# Altium schematic symbol library audio%.SchLib: 34 symbols
Pins are listed as number, name and electrical type; pins without a type are passive.

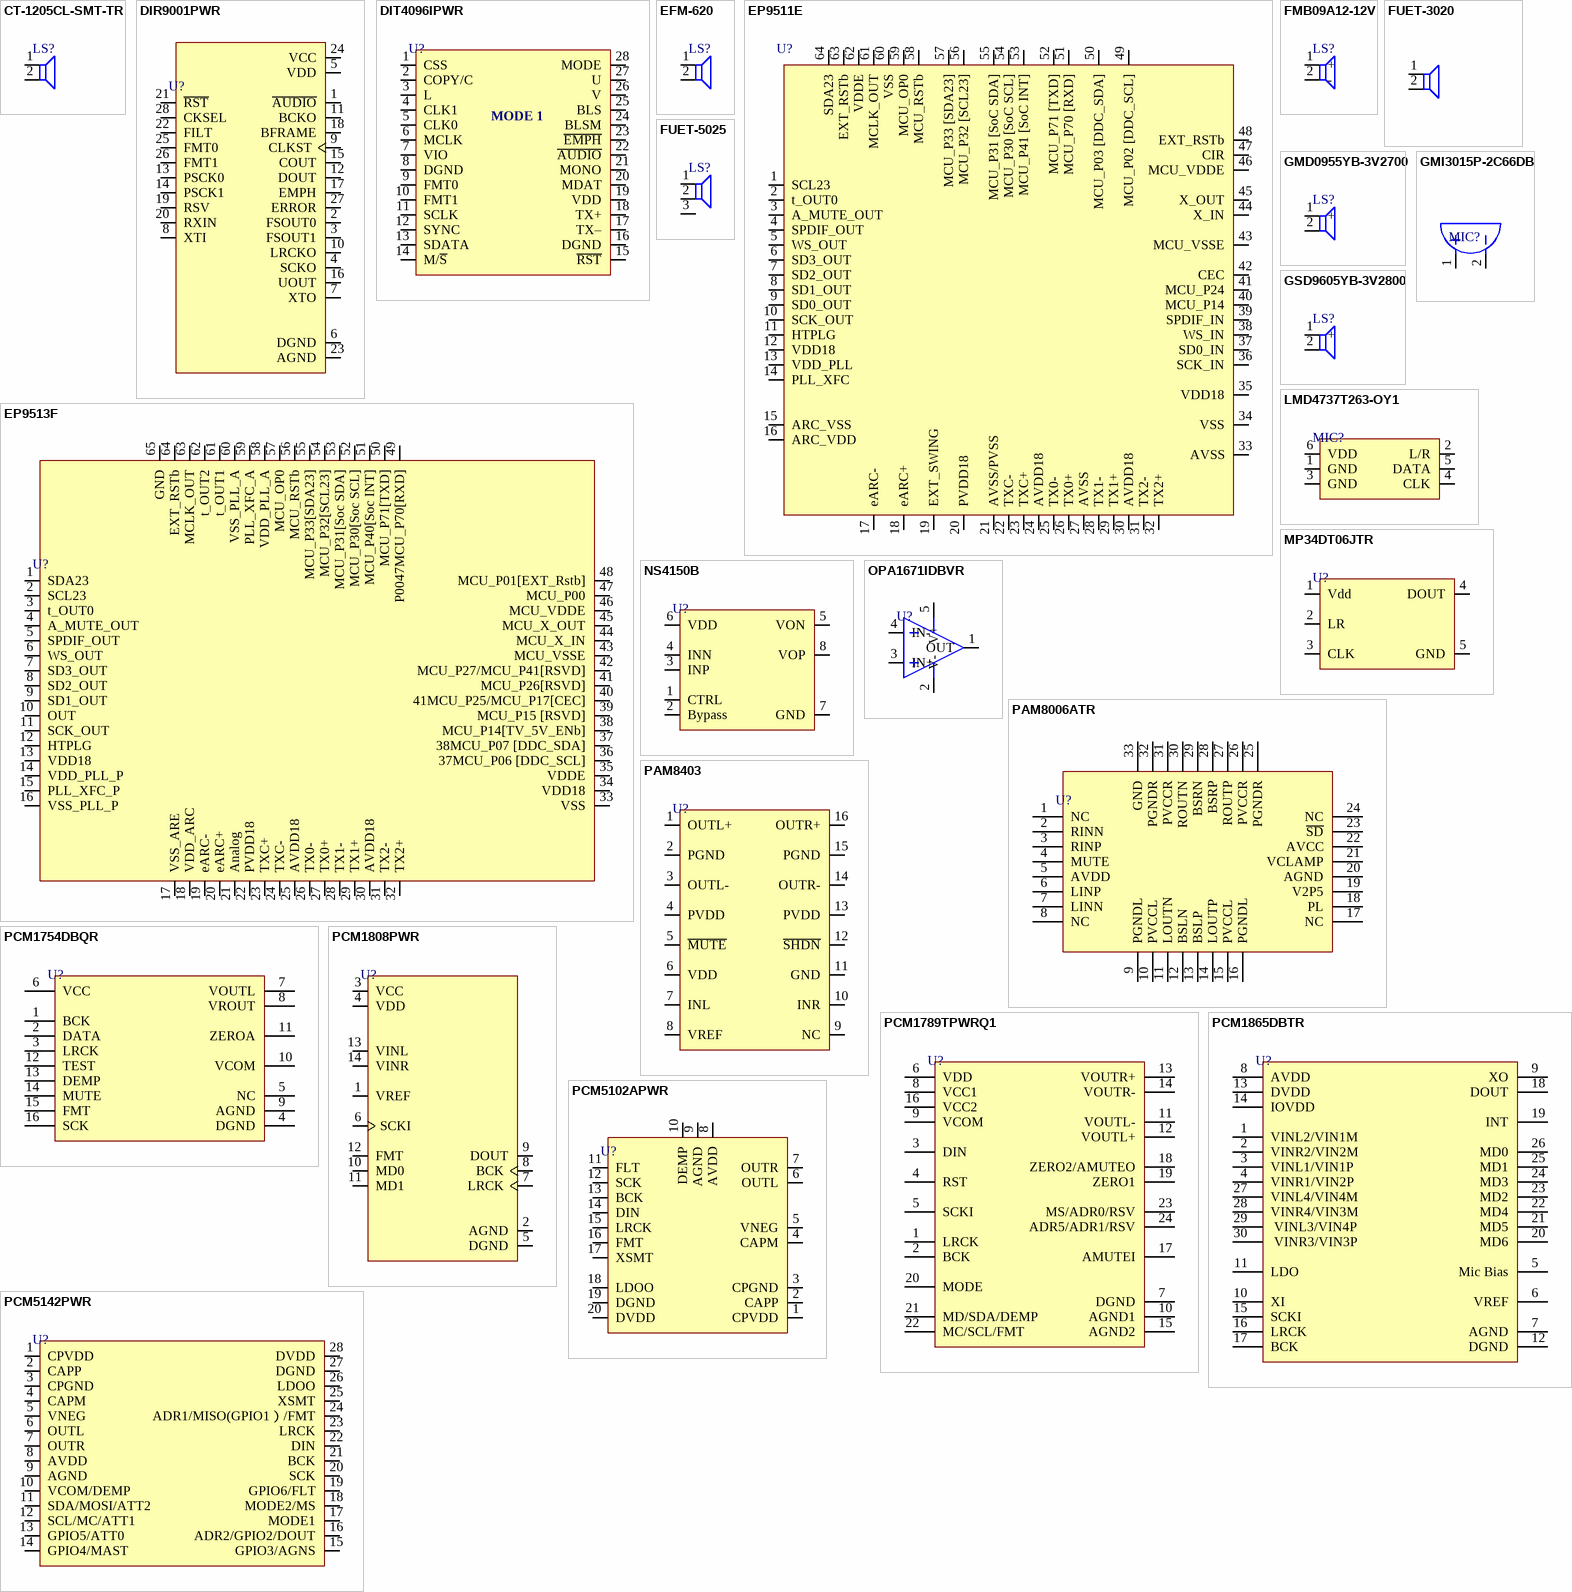
[diagram p0: symbols CT-1205CL-SMT-TR to PCM5142PWR]

## CT-1205CL-SMT-TR
designator LS?
12.8 mm, 5 V, 88 dB, 2.4 kHz, Surface Mount (SMT), Driving Circuit, Magnetic Audio Indicator Buzzer; Manufacturer: CUI; Manufacturer Part Number: CT-1205CL-SMT-TR; Frequency: 2.4kHz; Voltage Rating: 5V; Operating Supply Current: 30mA; Supplier: Digikey; Supplier Part Number: 102-1267-1-ND; RoHS: No; Category: Uncategorized; Stock: 58213; Pricing: 1=2.230000, 10=1.848000, 25=1.706400, 50=1.603400, 100=1.504100 (USD); Mounting Technology: Surface Mount; Case/Package: SMD/SMT; Min Operating Temperature: -30°C; Max Operating Temperature: 70°C; Termination: Solder; Package Quantity: 450; Packaging: Tape and Reel; Sensing Method: Magnetic; Length: 12.8mm; Width: 12.8mm; Height: 7.6mm; Lead Free: Lead Free; ComponentLink1URL: http://www.mouser.com/ds/2/670/ct-1205cl-smt-515776.pdf?src-supplier=Mouser; ComponentLink1Description: http://www.mouser.com/ds/2/670/ct-1205cl-smt-515776.pdf?src-supplier=Mouser; ComponentLink2URL: https://www.cui.com/product/resource/digikeypdf/ct-1205cl-smt.pdf?src-supplier=Digikey; ComponentLink2Description: https://www.cui.com/product/resource/digikeypdf/ct-1205cl-smt.pdf?src-supplier=Digikey
footprint CT-1205CL-SMT-TR
pins: 1 VCC, 2 GND

## DIR9001PWR
designator U?
IC AUDIO RECEIVER 28TSSOP; Manufacturer: Texas Instruments; Manufacturer Part Number: DIR9001PWR; Supplier: Mouser; Supplier Part Number: 595-DIR9001PWR; RoHS: Yes; Item Type: IC; Stock: 2518; Pricing: 1=3.45, 10=2.97, 50=2.97, 100=2.6, 1000=2.32, 10000=2.28 (USD); ComponentLink1URL: https://datasheet.ciiva.com/4770/sles198-127665-4770192.pdf?src-supplier=Mouser; ComponentLink1Description: https://datasheet.ciiva.com/4770/sles198-127665-4770192.pdf?src-supplier=Mouser; ComponentLink2URL: https://datasheet.ciiva.com/15134/getdatasheetpartid-306416-15134699.pdf?src-supplier=Verical; ComponentLink2Description: https://datasheet.ciiva.com/15134/getdatasheetpartid-306416-15134699.pdf?src-supplier=Verical; ComponentLink3URL: https://datasheet.ciiva.com/3148/dir9001-3148830.pdf?src-supplier=Avnet; ComponentLink3Description: https://datasheet.ciiva.com/3148/dir9001-3148830.pdf?src-supplier=Avnet; ComponentLink4URL: https://datasheet.ciiva.com/1826/dir9001-1826205.pdf?src-supplier=Digikey; ComponentLink4Description: https://datasheet.ciiva.com/1826/dir9001-1826205.pdf?src-supplier=Digikey
footprint TSSOP-28
pins: 1 ~{AUDIO}, 2 FSOUT0, 3 FSOUT1, 4 SCKO, 5 VDD, 6 DGND, 7 XTO, 8 XTI, 9 CLKST, 10 LRCKO, 11 BCKO, 12 DOUT, 13 PSCK0, 14 PSCK1, 15 COUT, 16 UOUT, 17 EMPH, 18 BFRAME, 19 RSV, 20 RXIN, 21 ~{RST}, 22 FILT, 23 AGND, 24 VCC, 25 FMT0, 26 FMT1, 27 ERROR, 28 CKSEL

## DIT4096IPWR
designator U?
96kHz Digital Audio Transmitter 28-TSSOP -40 to 85; Manufacturer: Texas Instruments; Manufacturer Part Number: DIT4096IPWR; Supplier: Digikey; Supplier Part Number: 296-DIT4096IPWRCT-ND; RoHS: Yes; Category: Amplifiers - Audio; Pricing: 1=3.39, 10=3.048, 25=2.8816, 100=2.4973, 250=2.36924, 500=2.12592, 1000=1.79295 (USD); ComponentLink1URL: https://datasheet.ciiva.com/1826/dit4096-1826182.pdf?src-supplier=Digikey; ComponentLink1Description: https://datasheet.ciiva.com/1826/dit4096-1826182.pdf?src-supplier=Digikey; ComponentLink2URL: https://datasheet.ciiva.com/3031/dit4096-3031069.pdf?src-supplier=Avnet; ComponentLink2Description: https://datasheet.ciiva.com/3031/dit4096-3031069.pdf?src-supplier=Avnet
footprint TSSOP-28
pins: 1 CSS, 2 COPY/C, 3 L, 4 CLK1, 5 CLK0, 6 MCLK, 7 VIO, 8 DGND, 9 FMT0, 10 FMT1, 11 SCLK, 12 SYNC, 13 SDATA, 14 M/~{S}, 15 ~{RST}, 16 DGND, 17 TX–, 18 TX+, 19 VDD, 20 MDAT, 21 MONO, 22 ~{AUDIO}, 23 ~{EMPH}, 24 BLSM, 25 BLS, 26 V, 27 U, 28 MODE
text: MODE 1

## EFM-620
designator LS?
BUZZER 9V 40MM TH; Manufacturer: East Electronics; Manufacturer Part Number: EFM-620; Pakage: Custom; Item Type: Buzzer; ComponentLink1Description: Digikey; ComponentLink1URL: https://www.digikey.com/en/products/detail/east-electronics/EFM-620/13170549
footprint EFM-620
pins: 1 -, 2 +

## EP9511E
designator U?
HDMI 1.4 Transmitterwith Audio In and eARC/ARC RX; Manufacturer: Semicon; Manufacturer Part Number: EP9511E; Item Type: IC; Package: QFN-64 (7x7)
footprint LQFP-64, (Body 7x 7)
pins: 1 SCL23, 2 t_OUT0, 3 A_MUTE_OUT, 4 SPDIF_OUT, 5 WS_OUT, 6 SD3_OUT, 7 SD2_OUT, 8 SD1_OUT, 9 SD0_OUT, 10 SCK_OUT, 11 HTPLG, 12 VDD18, 13 VDD_PLL, 14 PLL_XFC, 15 ARC_VSS, 16 ARC_VDD, 17 eARC-, 18 eARC+, 19 EXT_SWING, 20 PVDD18, 21 AVSS/PVSS, 22 TXC-, 23 TXC+, 24 AVDD18, 25 TX0-, 26 TX0+, 27 AVSS, 28 TX1-, 29 TX1+, 30 AVDD18, 31 TX2-, 32 TX2+, 33 AVSS, 34 VSS, 35 VDD18, 36 SCK_IN, 37 SD0_IN, 38 WS_IN, 39 SPDIF_IN, 40 MCU_P14, 41 MCU_P24, 42 CEC, 43 MCU_VSSE, 44 X_IN, 45 X_OUT, 46 MCU_VDDE, 47 CIR, 48 EXT_RSTb, 49 MCU_P02 [DDC_SCL], 50 MCU_P03 [DDC_SDA], 51 MCU_P70 [RXD], 52 MCU_P71 [TXD], 53 MCU_P41 [SoC INT], 54 MCU_P30 [SoC SCL], 55 MCU_P31 [SoC SDA], 56 MCU_P32 [SCL23], 57 MCU_P33 [SDA23], 58 MCU_RSTb, 59 MCU_OP0, 60 VSS, 61 MCLK_OUT, 62 VDDE, 63 EXT_RSTb, 64 SDA23

## EP9513F
designator U?
HDMI 2.1 Audio Tx; Manufacturer: Semicon; Manufacturer Part Number: EP9513F; Item Type: IC; Package: QFN-64 (8x8)
footprint QFN 64(8x8)
pins: 1 SDA23, 2 SCL23, 3 t_OUT0, 4 A_MUTE_OUT, 5 SPDIF_OUT, 6 WS_OUT, 7 SD3_OUT, 8 SD2_OUT, 9 SD1_OUT, 10 OUT, 11 SCK_OUT, 12 HTPLG, 13 VDD18, 14 VDD_PLL_P, 15 PLL_XFC_P, 16 VSS_PLL_P, 17 VSS_ARE, 18 VDD_ARC, 19 eARC-, 20 eARC+, 21 Analog, 22 PVDD18, 23 TXC+, 24 TXC-, 25 AVDD18, 26 TX0-, 27 TX0+, 28 TX1-, 29 TX1+, 30 AVDD18, 31 TX2-, 32 TX2+, 33 VSS, 34 VDD18, 35 VDDE, 36 37MCU_P06 [DDC_SCL], 37 38MCU_P07 [DDC_SDA], 38 MCU_P14[TV_5V_ENb], 39 MCU_P15 [RSVD], 40 41MCU_P25/MCU_P17[CEC], 41 MCU_P26[RSVD], 42 MCU_P27/MCU_P41[RSVD], 43 MCU_VSSE, 44 MCU_X_IN, 45 MCU_X_OUT, 46 MCU_VDDE, 47 MCU_P00, 48 MCU_P01[EXT_Rstb], 49 P0047MCU_P70[RXD], 50 MCU_P71[TXD], 51 MCU_P40[Soc INT], 52 MCU_P30[Soc SCL], 53 MCU_P31[Soc SDA], 54 MCU_P32[SCL23], 55 MCU_P33[SDA23], 56 MCU_RSTb, 57 MCU_OP0, 58 VDD_PLL_A, 59 PLL_XFC_A, 60 VSS_PLL_A, 61 t_OUT1, 62 t_OUT2, 63 MCLK_OUT, 64 EXT_RSTb, 65 GND

## FMB09A12-12V
designator LS?
80dB Active (driven circuit included) Magnetic 2.7kHz Plugin,D=9mm Buzzers ROHS; Manufacturer: FUET; Manufacturer Part Number: FMB09A12-12V; Package: Plugin,D=9mm; LCSC Part Number: C417387; Item Type: Buzzers; ComponentLink1Description: LCSC; ComponentLink1URL: https://www.lcsc.com/product-detail/Buzzers_FUET-FMB09A12-12V_C417387.html
footprint FMB09A12-12V
pins: 1 +, 2 -

## FUET-3020
designator LS?
SMD,3.2x3.2mm Buzzers ROHS; Manufacturer: FUET; Item Type: Buzzer; Manufacturer Part Number: FUET-3020; Package: SMD,3.2x3.2mm; LCSC Part Number: C2972843; ComponentLink1Description: LCSC; ComponentLink1URL: https://www.lcsc.com/product-detail/Buzzers_FUET-FUET-3020_C2972843.html
footprint FUET-3020
pins: 1 +, 2 -

## FUET-5025
designator LS?
80dB Passive (external drive) Electromagnetic Type 4kHz SMD,5x5mm Buzzers ROHS; Manufacturer: FUET; Manufacturer Part Number: FUET-5025; Package: SMD,5x5mm; LCSC Part Number: C391030; Item Type: Buzzers; ComponentLink1Description: LCSC; ComponentLink1URL: https://www.lcsc.com/product-detail/Buzzers_FUET-FUET-5025_C391030.html
footprint FUET-5025
pins: 1 +, 2 -, 3

## GMD0955YB-3V2700
designator LS?
80dB Active (Built-in Driver Circuit) Electromagnetic Type 2.7kHz Buzzers ROHS; Manufacturer: INGHAi; Manufacturer Part Number: GMD0955YB-3V2700; Package: Custom; LCSC Part Number: C252933; Item Type: Buzzers; ComponentLink1Description: LCSC; ComponentLink1URL: https://www.lcsc.com/product-detail/Buzzers_INGHAi-GMD0955YB-3V2700_C252933.html
footprint GMD0955YB-3V2700
pins: 1 +, 2 -

## GMI3015P-2C66DB
designator MIC?
Plugin,D=3mm Microphones ROHS; Manufacturer: INGHAi; Manufacturer Part Number: GMI3015P-2C66DB; Package: Plugin,D=3mm; LCSC Part Number: C529836; Item Type: Microphones; ComponentLink1Description: LCSC; ComponentLink1URL: https://www.lcsc.com/product-detail/span-style-background-color-ff0-Microphones-span_INGHAi-GMI3015P-2C66DB_C529836.html
footprint GMI3015P-2C66DB
pins: 1, 2

## GSD9605YB-3V2800
designator LS?
80dB Active (Built-in Driver Circuit) Electromagnetic Type 2.7kHz Buzzers ROHS; Manufacturer: INGHAi; Manufacturer Part Number: GSD9605YB-3V2800; Item Type: Buzzer; Package: Custom; LCSC Part Number: C255327; ComponentLink1Description: LCSC; ComponentLink1URL: https://www.lcsc.com/product-detail/Buzzers_INGHAi-GSD9605YB-3V2800_C255327.html
footprint GSD9605YB-3V2800
pins: 1 +, 2 -

## LMD4737T263-OY1
designator MIC?
Omnidirectional -26dB 57dB SMD-6P,4.7x3.8mm MEMS Microphones ROHS; Manufacturer: LinkMems; Manufacturer Part Number: LMD4737T263-OY1; Package: SMD-6P,4.7x3.8mm; LCSC Part Number: C5373239; Item Type: Microphones; ComponentLink1Description: LCSC; ComponentLink1URL: https://www.lcsc.com/product-detail/MEMS-Microphones_LinkMems-LMD4737T263-OY1_C5373239.html
footprint LMD4737T263-OY1
pins: 1 GND, 2 L/R, 3 GND, 4 CLK, 5 DATA, 6 VDD

## MP34DT06JTR
designator U?
MIC MEMS DIGITAL PDM OMNI -26DB; Manufacturer: STMicroelectronics; Manufacturer Part Number: MP34DT06JTR; Shape: Rectangular; Direction: Omnidirectional; Voltage Rating: 1.8V; Operating Supply Current: 650uA; Item Type: Microphone; Supplier 1: Mouser; RoHS: Yes; Category: Microphones; Stock 1: 6064; Pricing 1: 1=2.31, 10=1.92, 50=1.6, 100=1.51, 1000=1.24, 10000=1.23 (USD); Packaging: Cut Tape; Termination: Solder; Series: -; RoHS Compliant: Yes; ComponentLink1URL: http://www.farnell.com/datasheets/2710895.pdf?src-supplier=Farnell; ComponentLink1Description: http://www.farnell.com/datasheets/2710895.pdf?src-supplier=Farnell; ComponentLink2URL: https://www.st.com/resource/en/datasheet/mp34dt06j.pdf?src-supplier=Digi-Key; ComponentLink2Description: https://www.st.com/resource/en/datasheet/mp34dt06j.pdf?src-supplier=Digi-Key; ComponentLink3URL: http://www.farnell.com/datasheets/2710895.pdf?src-supplier=Newark; ComponentLink3Description: http://www.farnell.com/datasheets/2710895.pdf?src-supplier=Newark; ComponentLink4URL: http://www.farnell.com/datasheets/2710895.pdf?src-supplier=Element14; ComponentLink4Description: http://www.farnell.com/datasheets/2710895.pdf?src-supplier=Element14; Supplier Part Number 1: 511-MP34DT06JTR; LCSC Part Number: C503097
footprint MP34DT06JTR
pins: 1 Vdd, 2 LR, 3 CLK, 4 DOUT, 5 GND

## NS4150B
designator U?
3Wx1@4Ω Class D MSOP-8 Audio Power OpAmps ROHS; Manufacturer: Shenzhen Nsiway Tech; Manufacturer Part Number: NS4150B; Item Type: IC; Package: MSOP-8; LCSC Part Number: C189961; ComponentLink1Description: LCSC; ComponentLink1URL: https://www.lcsc.com/product-detail/Audio-Power-OpAmps_Shenzhen-Nsiway-Tech-NS4150B_C189961.html
footprint 8-MSOP (0.118", 3.00mm Width)
pins: 1 CTRL, 2 Bypass, 3 INP, 4 INN, 5 VON, 6 VDD, 7 GND, 8 VOP

## OPA1671IDBVR
designator U?
IC AUDIO 1 CIRCUIT SOT23-5; Manufacturer: Texas Instruments; Manufacturer Part Number: OPA1671IDBVR; Description: Low-Noise/Rail-to-Rail Audio Operational Amplifier 5V/us 5-Pin SOT-23 T/R; Supplier: Mouser; LCSC Part Number: C1849409; RoHS: Yes; Item Type: IC; Stock: 6432; Pricing: 1=1.09, 10=0.786, 50=0.711, 100=0.627, 1000=0.536, 10000=0.505 (USD)
footprint SOT-23-5
pins: 1 OUT, 2 V- (power), 3 IN+, 4 IN-, 5 V+ (power)

## PAM8006ATR
designator U?
IC AMP AUDIO 15W CLASS D 32UQFN; Manufacturer: Diodes; Manufacturer Part Number: PAM8006ATR; Voltage Gain: 32dB; Min Supply Voltage: 8V; Max Supply Voltage: 18V; Max Output Power: 10W; Power Supply Rejection Ratio (PSRR): 65dB; Supplier 1: Rs; RoHS: Yes; Category: Amplifiers - Audio; Stock 1: 596; Pricing 1: 2=2.11500 (GBP); Mounting Technology: Surface Mount; Case/Package: QFN; Pins: 32; Min Operating Temperature: -20°C; Max Operating Temperature: 85°C; Packaging: Tape and Reel; Package Quantity: 3000; Series: -; Length: 5mm; Width: 5mm; Height: 0.75mm; Radiation Hardening: No; Lead Free: Lead Free; RoHS Compliant: Yes; ComponentLink1URL: https://datasheet.ciiva.com/24013/pam8006a-247273-24013164.pdf?src-supplier=Mouser; ComponentLink1Description: https://datasheet.ciiva.com/24013/pam8006a-247273-24013164.pdf?src-supplier=Mouser; ComponentLink2URL: https://datasheet.ciiva.com/29896/pam8006a-29896322.pdf?src-supplier=Avnet; ComponentLink2Description: https://datasheet.ciiva.com/29896/pam8006a-29896322.pdf?src-supplier=Avnet; ComponentLink3URL: https://datasheet.ciiva.com/30481/0900766b81268cf3-30481630.pdf?src-supplier=Rs; ComponentLink3Description: https://datasheet.ciiva.com/30481/0900766b81268cf3-30481630.pdf?src-supplier=Rs; Supplier Part Number 1: 7902950; LCSC Part Number: C167118; Item Type: IC
footprint 32-QFN (32pins, 5x5mm body, 0.5mm pitch QFN package)
pins: 1 NC, 2 RINN, 3 RINP, 4 MUTE, 5 AVDD, 6 LINP, 7 LINN, 8 NC, 9 PGNDL, 10 PVCCL, 11 LOUTN, 12 BSLN, 13 BSLP, 14 LOUTP, 15 PVCCL, 16 PGNDL, 17 NC, 18 PL, 19 V2P5, 20 AGND, 21 VCLAMP, 22 AVCC, 23 ~{SD}, 24 NC, 25 PGNDR, 26 PVCCR, 27 ROUTP, 28 BSRP, 29 BSRN, 30 ROUTN, 31 PVCCR, 32 PGNDR, 33 GND

## PAM8403
designator U?
SOP-16 Audio Power OpAmps ROHS; Manufacturer: Slkor; Manufacturer Part Number: PAM8403; Item Type: IC; Package: SOP-16; LCSC Part Number: C5122557; ComponentLink1Description: LCSC; ComponentLink1URL: https://www.lcsc.com/product-detail/Audio-Power-OpAmps_Slkor-SLKORMICRO-Elec-PAM8403_C5122557.html
footprint SOP-16_150mil
pins: 1 OUTL+, 2 PGND, 3 OUTL-, 4 PVDD, 5 ~{MUTE}, 6 VDD, 7 INL, 8 VREF, 9 NC, 10 INR, 11 GND, 12 ~{SHDN}, 13 PVDD, 14 OUTR-, 15 PGND, 16 OUTR+

## PCM1754DBQR
designator U?
IC DAC/AUDIO 24BIT 200K 16SSOP; Manufacturer: Texas Instruments; Manufacturer Part Number: PCM1754DBQR; Number of DAC Channels: 2; Operating Supply Voltage: 5V; Max Power Dissipation: 105mW; Interface: Serial,3-WIRE; Number of Bits: 24; Sampling Rate: 192000S/s; Resolution: 24b; Signal to Noise Ratio (SNR): 106dB; Supply Type: Single; Conversion Rate: 192KS/s; Nominal Supply Current: 30mA; Power Consumption: 80mW; Number of Analog Inputs: 0; Output Type: Voltage; Min Supply Voltage: 4.5V; Max Supply Voltage: 5.5V; Integral Nonlinearity (INL): 0.5LSB; Polarity: Bipolar; Supplier 1: Mouser; RoHS: Yes; Category: Amplifiers - Audio; Stock 1: 908; Pricing 1: 1=2.14000, 10=1.93000, 25=1.82000, 50=1.82000, 100=1.55000, 250=1.46000, 500=1.28000, 1000=1.06000, 10000=1.06000 (USD); Mount: Surface Mount; Case/Package: SSOP; Number of Pins: 16; Weight: 0.002603oz; Contact Plating: Gold; Min Operating Temperature: -40°C; Max Operating Temperature: 85°C; Packaging: Tape and Reel; Number of Channels: 2; Package Quantity: 2000; Number of Converters: 2; Number of Analog Outputs: 2; Series: PCM1754; Output Polarity: Bipolar; Length: 5mm; Width: 4mm; Height: 1.5mm; Radiation Hardening: No; Lead Free: Lead Free; RoHS Compliant: Yes; ComponentLink1URL: https://datasheet.ciiva.com/41460/001186173-da-01-en-ic-dac-24bit-mon-pcm1754dbqr-ssop-16-tid-41460109.pdf?src-supplier=Conrad; ComponentLink1Description: https://datasheet.ciiva.com/41460/001186173-da-01-en-ic-dac-24bit-mon-pcm1754dbqr-ssop-16-tid-41460109.pdf?src-supplier=Conrad; ComponentLink2URL: https://datasheet.ciiva.com/1388/pcm1753-1388404.pdf?src-supplier=Digi-Key; ComponentLink2Description: https://datasheet.ciiva.com/1388/pcm1753-1388404.pdf?src-supplier=Digi-Key; ComponentLink3URL: https://datasheet.ciiva.com/1388/pcm1753-1388403.pdf?src-supplier=Digi-Key; ComponentLink3Description: https://datasheet.ciiva.com/1388/pcm1753-1388403.pdf?src-supplier=Digi-Key; ComponentLink4URL: https://datasheet.ciiva.com/1388/pcm1753-1388405.pdf?src-supplier=Digi-Key; ComponentLink4Description: https://datasheet.ciiva.com/1388/pcm1753-1388405.pdf?src-supplier=Digi-Key; ComponentLink5URL: https://datasheet.ciiva.com/15146/getdatasheetpartid-213919-15146955.pdf?src-supplier=Verical; ComponentLink5Description: https://datasheet.ciiva.com/15146/getdatasheetpartid-213919-15146955.pdf?src-supplier=Verical; Supplier Part Number 1: 595-PCM1754DBQR; Item Type: IC
footprint 16-SSOP
pins: 1 BCK, 2 DATA, 3 LRCK, 4 DGND, 5 NC, 6 VCC, 7 VOUTL, 8 VROUT, 9 AGND, 10 VCOM, 11 ZEROA, 12 TEST, 13 DEMP, 14 MUTE, 15 FMT, 16 SCK

## PCM1789TPWRQ1
designator U?
IC DAC/AUDIO 24BIT 192K 24TSSOP; Manufacturer: Texas Instruments; Manufacturer Part Number: PCM1789TPWRQ1; Number of Channels: 2; Operating Supply Voltage: 5V; Min Supply Voltage: 4.5V; Max Supply Voltage: 5.5V; Interface: I2C,SPI,Serial,3-WIRE; Max Power Dissipation: 239mW; Number of Bits: 24; Resolution: 24b; Supply Type: Analog,Digital; Conversion Rate: 192KS/s; Power Consumption: 154mW; Number of Analog Inputs: 0; Output Type: Voltage; Supplier 1: Digi-Key; RoHS: Yes; Category: Amplifiers - Audio; Mount: Surface Mount; Case/Package: TSSOP; Number of Pins: 24; Min Operating Temperature: -40°C; Max Operating Temperature: 105°C; Packaging: Tape and Reel; Number of DAC Channels: 2; Package Quantity: 2000; Number of Converters: 2; Number of Analog Outputs: 2; Series: PCM1789-Q1; Lead Free: Lead Free; RoHS Compliant: Yes; ComponentLink1URL: https://datasheet.ciiva.com/1389/pcm1789-q1-1389256.pdf?src-supplier=Digi-Key; ComponentLink1Description: https://datasheet.ciiva.com/1389/pcm1789-q1-1389256.pdf?src-supplier=Digi-Key; ComponentLink2URL: https://datasheet.ciiva.com/14255/sbas546-14255107.pdf?src-supplier=Avnet; ComponentLink2Description: https://datasheet.ciiva.com/14255/sbas546-14255107.pdf?src-supplier=Avnet; Supplier Part Number 1: 296-28413-1-ND; LCSC Part Number: C2864058; Item Type: IC
footprint 24-TSSOP_
pins: 1 LRCK, 2 BCK, 3 DIN, 4 RST, 5 SCKI, 6 VDD, 7 DGND, 8 VCC1, 9 VCOM, 10 AGND1, 11 VOUTL-, 12 VOUTL+, 13 VOUTR+, 14 VOUTR-, 15 AGND2, 16 VCC2, 17 AMUTEI, 18 ZERO2/AMUTEO, 19 ZERO1, 20 MODE, 21 MD/SDA/DEMP, 22 MC/SCL/FMT, 23 MS/ADR0/RSV, 24 ADR5/ADR1/RSV

## PCM1808PWR
designator U?
IC ADC/AUDIO 24BIT 96K 14TSSOP; Manufacturer: Texas Instruments; Manufacturer Part Number: PCM1808PWR; Item Type: Amplifiers - Audio; Supplier: Mouser; Supplier Part Number: 595-PCM1808PWR; RoHS: Yes; Stock: 10269; Pricing: 1=1.6, 10=1.36, 50=1.36, 100=1.16, 1000=0.786, 10000=0.744 (USD); ComponentLink1URL: https://datasheet.ciiva.com/41460/001186600-da-01-en-ic-adc-24bit-ste-pcm1808pwr-tssop-14-tid-41460829.pdf?src-supplier=Conrad; ComponentLink1Description: https://datasheet.ciiva.com/41460/001186600-da-01-en-ic-adc-24bit-ste-pcm1808pwr-tssop-14-tid-41460829.pdf?src-supplier=Conrad; ComponentLink2URL: https://datasheet.ciiva.com/7989/1764047-7989228.pdf?src-supplier=Element14; ComponentLink2Description: https://datasheet.ciiva.com/7989/1764047-7989228.pdf?src-supplier=Element14; ComponentLink3URL: https://datasheet.ciiva.com/1260/pcm1808-1260372.pdf?src-supplier=Digikey; ComponentLink3Description: https://datasheet.ciiva.com/1260/pcm1808-1260372.pdf?src-supplier=Digikey; ComponentLink4URL: https://datasheet.ciiva.com/1260/pcm1808-1260370.pdf?src-supplier=Digikey; ComponentLink4Description: https://datasheet.ciiva.com/1260/pcm1808-1260370.pdf?src-supplier=Digikey; ComponentLink5URL: https://datasheet.ciiva.com/1260/pcm1808-1260371.pdf?src-supplier=Digikey; ComponentLink5Description: https://datasheet.ciiva.com/1260/pcm1808-1260371.pdf?src-supplier=Digikey; ComponentLink6URL: https://datasheet.ciiva.com/15148/getdatasheetpartid-184690-15148071.pdf?src-supplier=Verical; ComponentLink6Description: https://datasheet.ciiva.com/15148/getdatasheetpartid-184690-15148071.pdf?src-supplier=Verical; LCSC Part Number: C55513
footprint 14-TSSOP
pins: 1 VREF, 2 AGND, 3 VCC, 4 VDD, 5 DGND, 6 SCKI, 7 LRCK, 8 BCK, 9 DOUT, 10 MD0, 11 MD1, 12 FMT, 13 VINL, 14 VINR

## PCM1865DBTR
designator U?
IC ADC/AUDIO 24BIT 192K 30TSSOP; Manufacturer: Texas Instruments; Manufacturer Part Number: PCM1865DBTR; Interface: I2C,SPI,Serial; Operating Supply Voltage: 3.3V; Sampling Rate: 192KS/s; Resolution: 24b; Operating Supply Current: 31mA; Supply Type: Single; Number of A/D Converters: 4; Power Consumption: 145mW; Max Supply Voltage: 3.6V; Min Supply Voltage: 3V; Number of Analog Inputs: 8; Number of DAC Channels: 0; Supplier 1: Mouser; RoHS: Yes; Category: Amplifiers - Audio; Pricing 1: 1=10.72000, 10=9.69000, 25=9.23000, 50=9.23000, 100=8.02000, 250=7.66000, 500=6.98000, 1000=6.54000, 10000=6.54000 (USD); Mount: Surface Mount; Case/Package: TSSOP; Number of Pins: 30; Weight: 0.003439oz; Contact Plating: Gold; Min Operating Temperature: -40°C; Max Operating Temperature: 125°C; Package Quantity: 2000; Packaging: Tape and Reel; Number of ADC Channels: 4; Lead Free: Lead Free; RoHS Compliant: Yes; ComponentLink1URL: https://datasheet.ciiva.com/48474/pcm1861-48474798.pdf?src-supplier=Avnet; ComponentLink1Description: https://datasheet.ciiva.com/48474/pcm1861-48474798.pdf?src-supplier=Avnet; ComponentLink2URL: https://datasheet.ciiva.com/29699/pcm1861-29699238.pdf?src-supplier=Digi-Key; ComponentLink2Description: https://datasheet.ciiva.com/29699/pcm1861-29699238.pdf?src-supplier=Digi-Key; Supplier Part Number 1: 595-PCM1865DBTR; LCSC Part Number: C181312
footprint TSSOP-30
pins: 1 VINL2/VIN1M, 2 VINR2/VIN2M, 3 VINL1/VIN1P, 4 VINR1/VIN2P, 5 Mic Bias, 6 VREF, 7 AGND, 8 AVDD, 9 XO, 10 XI, 11 LDO, 12 DGND, 13 DVDD, 14 IOVDD, 15 SCKI, 16 LRCK, 17 BCK, 18 DOUT, 19 INT, 20 MD6, 21 MD5, 22 MD4, 23 MD2, 24 MD3, 25 MD1, 26 MD0, 27 VINL4/VIN4M, 28 VINR4/VIN3M, 29  VINL3/VIN4P, 30  VINR3/VIN3P

## PCM5102APWR
designator U?
IC DAC 16/24/32BIT 384K 20TSSOP; Manufacturer: Texas Instruments; Manufacturer Part Number: PCM5102APWR; Supplier: Mouser; Supplier Part Number: 595-PCM5102APWR; RoHS: Yes; Category: Digital to Analog Converters (DACs); Stock: 2740; Pricing: 1=5.76, 10=4.87, 50=4.87, 100=4.1, 1000=3.13, 10000=2.65 (USD); ComponentLink1URL: https://datasheet.ciiva.com/24021/slas859a-261040-24021907.pdf?src-supplier=Mouser; ComponentLink1Description: https://datasheet.ciiva.com/24021/slas859a-261040-24021907.pdf?src-supplier=Mouser; ComponentLink2URL: https://datasheet.ciiva.com/29648/pcm5102a-29648362.pdf?src-supplier=Digi-Key; ComponentLink2Description: https://datasheet.ciiva.com/29648/pcm5102a-29648362.pdf?src-supplier=Digi-Key; ComponentLink3URL: https://datasheet.ciiva.com/6673/pcm5102a-6673611.pdf?src-supplier=Digi-Key; ComponentLink3Description: https://datasheet.ciiva.com/6673/pcm5102a-6673611.pdf?src-supplier=Digi-Key; LCSC Part Number: C107671; Item Type: IC
footprint TSSOP-20
pins: 1 CPVDD, 2 CAPP, 3 CPGND, 4 CAPM, 5 VNEG, 6 OUTL, 7 OUTR, 8 AVDD, 9 AGND, 10 DEMP, 11 FLT, 12 SCK, 13 BCK, 14 DIN, 15 LRCK, 16 FMT, 17 XSMT, 18 LDOO, 19 DGND, 20 DVDD

## PCM5142PWR
designator U?
IC DAC 16/24/32BIT 384K 28TSSOP; Manufacturer: Texas Instruments; Manufacturer Part Number: PCM5142PWR; Item Type: Amplifiers - Audio; Supplier: Mouser; Supplier Part Number: 595-PCM5142PWR; RoHS: Yes; Stock: 1067; Pricing: 1=5.34, 10=4.96, 50=4.78, 100=4.34, 1000=3.64, 10000=3.26 (USD); ComponentLink1URL: https://datasheet.ciiva.com/6666/pcm5142-6666454.pdf?src-supplier=Digikey; ComponentLink1Description: https://datasheet.ciiva.com/6666/pcm5142-6666454.pdf?src-supplier=Digikey; ComponentLink2URL: https://datasheet.ciiva.com/6666/pcm5142-6666455.pdf?src-supplier=Digikey; ComponentLink2Description: https://datasheet.ciiva.com/6666/pcm5142-6666455.pdf?src-supplier=Digikey; ComponentLink3URL: https://datasheet.ciiva.com/6666/pcm5142-6666456.pdf?src-supplier=Digikey; ComponentLink3Description: https://datasheet.ciiva.com/6666/pcm5142-6666456.pdf?src-supplier=Digikey; LCSC Part Number: C180370
footprint TSSOP-28
pins: 1 CPVDD, 2 CAPP, 3 CPGND, 4 CAPM, 5 VNEG, 6 OUTL, 7 OUTR, 8 AVDD, 9 AGND, 10 VCOM/DEMP, 11 SDA/MOSI/ATT2, 12 SCL/MC/ATT1, 13 GPIO5/ATT0, 14 GPIO4/MAST, 15 GPIO3/AGNS, 16 ADR2/GPIO2/DOUT, 17 MODE1, 18 MODE2/MS, 19 GPIO6/FLT, 20 SCK, 21 BCK, 22 DIN, 23 LRCK, 24 ADR1/MISO(GPIO1）/FMT, 25 XSMT, 26 LDOO, 27 DGND, 28 DVDD

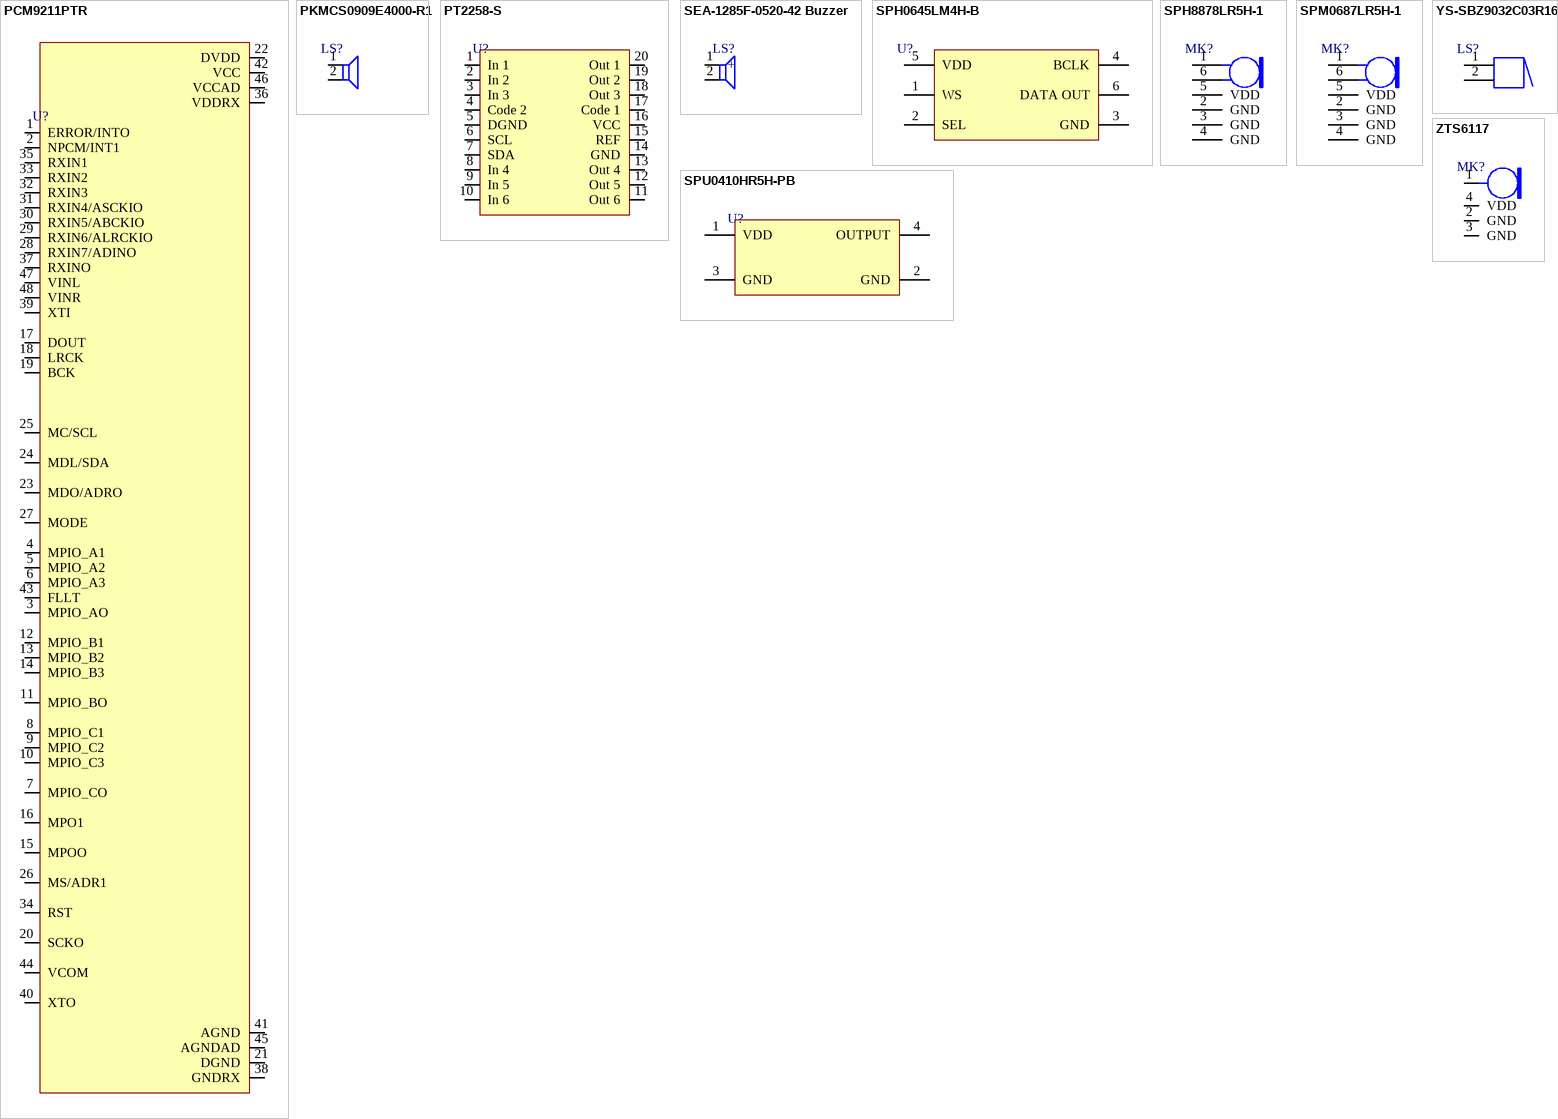
[diagram p1: symbols PCM9211PTR to ZTS6117]

## PCM9211PTR
designator U?
IC AUDIO TRANSCEIVER 48LQFP; Manufacturer: Texas Instruments; Manufacturer Part Number: PCM9211PTR; Item Type: Amplifiers - Audio; Supplier: Mouser; Supplier Part Number: 595-PCM9211PTR; RoHS: Yes; Stock: 2280; Pricing: 1=3.06, 10=2.74, 50=2.74, 100=2.51, 1000=1.8, 10000=1.49 (USD); ComponentLink1URL: https://datasheet.ciiva.com/1825/pcm9211-1825949.pdf?src-supplier=Digikey; ComponentLink1Description: https://datasheet.ciiva.com/1825/pcm9211-1825949.pdf?src-supplier=Digikey; ComponentLink2URL: https://datasheet.ciiva.com/3026/sbas495-3026720.pdf?src-supplier=Avnet; ComponentLink2Description: https://datasheet.ciiva.com/3026/sbas495-3026720.pdf?src-supplier=Avnet; ComponentLink3URL: https://datasheet.ciiva.com/1825/pcm9211-1825950.pdf?src-supplier=Digikey; ComponentLink3Description: https://datasheet.ciiva.com/1825/pcm9211-1825950.pdf?src-supplier=Digikey; ComponentLink4URL: https://datasheet.ciiva.com/1825/pcm9211-1825951.pdf?src-supplier=Digikey; ComponentLink4Description: https://datasheet.ciiva.com/1825/pcm9211-1825951.pdf?src-supplier=Digikey
footprint 48-LQFP (7x7)
pins: 1 ERROR/INTO, 2 NPCM/INT1, 3 MPIO_AO, 4 MPIO_A1, 5 MPIO_A2, 6 MPIO_A3, 7 MPIO_CO, 8 MPIO_C1, 9 MPIO_C2, 10 MPIO_C3, 11 MPIO_BO, 12 MPIO_B1, 13 MPIO_B2, 14 MPIO_B3, 15 MPOO, 16 MPO1, 17 DOUT, 18 LRCK, 19 BCK, 20 SCKO, 21 DGND, 22 DVDD, 23 MDO/ADRO, 24 MDL/SDA, 25 MC/SCL, 26 MS/ADR1, 27 MODE, 28 RXIN7/ADINO, 29 RXIN6/ALRCKIO, 30 RXIN5/ABCKIO, 31 RXIN4/ASCKIO, 32 RXIN3, 33 RXIN2, 34 RST, 35 RXIN1, 36 VDDRX, 37 RXINO, 38 GNDRX, 39 XTI, 40 XTO, 41 AGND, 42 VCC, 43 FLLT, 44 VCOM, 45 AGNDAD, 46 VCCAD, 47 VINL, 48 VINR

## PKMCS0909E4000-R1
designator LS?
BUZZER PIEZO 1.5V 9X9MM SMD; Manufacturer: Murata; Manufacturer Part Number: PKMCS0909E4000-R1; Supplier: Rs; Supplier Part Number: 9010898P; RoHS: Yes; Category: Buzzers; Stock: 4400; Pricing: 50=0.646, 100=0.598, 250=0.55, 500=0.504 (GBP); ComponentLink1URL: https://datasheet.ciiva.com/24244/pkmcs0909e4000-r1-304946-24244386.pdf?src-supplier=Mouser; ComponentLink1Description: https://datasheet.ciiva.com/24244/pkmcs0909e4000-r1-304946-24244386.pdf?src-supplier=Mouser; Item Type: BUZZER
footprint PKMCS0909E4000-R1
pins: 1 +, 2 -

## PT2258-S
designator U?
SOP-20-300mil Audio Interface ICs ROHS; Manufacturer: PTC; Manufacturer Part Number: PT2258-S; Item Type: IC; Package: SOP-20-300mil; LCSC Part Number: C99213; ComponentLink1Description: LCSC; ComponentLink1URL: https://www.lcsc.com/product-detail/Audio-Interface-ICs_PTC-Princeton-Tech-PT2258-S_C99213.html
footprint SOP-20-300mil
pins: 1 In 1, 2 In 2, 3 In 3, 4 Code 2, 5 DGND, 6 SCL, 7 SDA, 8 In 4, 9 In 5, 10 In 6, 11 Out 6, 12 Out 5, 13 Out 4, 14 GND, 15 REF, 16 VCC, 17 Code 1, 18 Out 3, 19 Out 2, 20 Out 1

## SEA-1285F-0520-42 Buzzer
designator LS?
85dB Passive (external drive) Electromagnetic Type 2kHz Plugin,D=12mm Buzzers ROHS; Manufacturer: S&S; Manufacturer Part Number: SEA-1285F-0520-42Ω-40P6.5; LCSC Part Number: C2693578; Item Type: Buzzers; ComponentLink1Description: LCSC; ComponentLink1URL: https://www.lcsc.com/product-detail/Buzzers_S-S-SEA-1285F-0520-42-40P6-5_C2693578.html
footprint Plugin,D=12mm
pins: 1 +, 2 -

## SPH0645LM4H-B
designator U?
CRAWFORD MIC DGT I2S BOTTOM PORT; Manufacturer: Knowles; Manufacturer Part Number: SPH0645LM4H-B; Shape: Rectangular; Direction: Omnidirectional; Voltage Rating: 1.8V; Operating Supply Current: 600uA; Output Type: Digital; Supplier 1: Digi-Key; Stock 1: 20813; Pricing 1: 1=2.88, 10=2.384, 25=2.2008, 50=2.0678, 100=1.9398, 500=1.66194, 1000=1.64372 (USD); Packaging: Tape and Reel; Termination: Solder; Length: 3.5mm; Width: 2.65mm; Height: 1.08mm; RoHS Compliant: Yes; ComponentLink1URL: https://media.digikey.com/pdf/Data%20Sheets/Knowles%20Acoustics%20PDFs/SPH0645LM4H-B.pdf?src-supplier=Digi-Key; ComponentLink1Description: https://media.digikey.com/pdf/Data%20Sheets/Knowles%20Acoustics%20PDFs/SPH0645LM4H-B.pdf?src-supplier=Digi-Key; Supplier Part Number 1: 423-1405-1-ND
footprint SPH0645LM4H-B_ (MEMS Microphones DIG MEMs Mic, BP w/ I2S output)
pins: 1 WS, 2 SEL, 3 GND, 4 BCLK, 5 VDD, 6 DATA OUT

## SPH8878LR5H-1
designator MK?
Lovato Analog Bottom Port Mic; Manufacturer: Knowles; Manufacturer Part Number: SPH8878LR5H-1; Item Type: Microphone; Supplier 1: Digi-Key; RoHS: No; Category: Microphones; Stock 1: 1676; Pricing 1: 1=1.45000, 10=1.20800, 25=1.11760, 50=1.05220, 100=0.98880, 500=0.85076, 1000=0.79529 (USD); Supplier Part Number 1: 423-SPH8878LR5H-1CT-ND; LCSC Part Number: *
footprint SPH8878LR5H-1
pins: 1 OUT+, 2 GND, 3 GND, 4 GND, 5 VDD, 6 OUT-

## SPM0687LR5H-1
designator MK?
WINFREY MIC HI SNR/AOP BOT PORT; Manufacturer: Knowles; Manufacturer Part Number: SPM0687LR5H-1; Shape: Rectangular; Output Type: Analog; Operating Supply Current: 285uA; Item Type: Microphone; Supplier 1: Digi-Key; RoHS: Yes; Category: Microphones; Stock 1: 116440; Pricing 1: 1=2.12000, 10=1.75900, 25=1.62560, 50=1.52880, 100=1.43540, 500=1.23212, 1000=1.17611 (USD); Packaging: Cut Tape; Termination: Solder; ComponentLink1URL: https://media.digikey.com/pdf/Data%20Sheets/Knowles%20Acoustics%20PDFs/SPM0687LR5H-1.pdf?src-supplier=Digi-Key; ComponentLink1Description: https://media.digikey.com/pdf/Data%20Sheets/Knowles%20Acoustics%20PDFs/SPM0687LR5H-1.pdf?src-supplier=Digi-Key; Supplier Part Number 1: 423-SPM0687LR5H-1CT-ND; LCSC Part Number: *
footprint SPM0687LR5H-1
pins: 1 OUT+, 2 GND, 3 GND, 4 GND, 5 VDD, 6 OUT-

## SPU0410HR5H-PB
designator U?
SPU-TOP MIC IOT FOCUSED MIC; Manufacturer: Knowles; Manufacturer Part Number: SPU0410HR5H-PB; Shape: Rectangular; Impedance: 300R; Voltage Rating: 3.6V; Direction: Omnidirectional; Operating Supply Current: 250uA; Signal to Noise Ratio (SNR): 59dB; Output Type: Analog; Supplier 1: Digi-Key; Stock 1: 83682; Pricing 1: 1=0.82, 10=0.688, 25=0.6376, 50=0.6006, 100=0.5649, 500=0.48696 (USD); Package Quantity: 1200; Packaging: Tape and Reel; Operating Supply Voltage: 3.6V; Termination: SMD/SMT; Length: 3.76mm; Height: 1.2mm; Width: 2.95mm; Depth: 1.2mm; ComponentLink1URL: https://media.digikey.com/pdf/Data%20Sheets/Knowles%20Acoustics%20PDFs/SiSonic_Design_Guide.pdf?src-supplier=Mouser; ComponentLink1Description: https://media.digikey.com/pdf/Data%20Sheets/Knowles%20Acoustics%20PDFs/SiSonic_Design_Guide.pdf?src-supplier=Mouser; ComponentLink2URL: https://media.digikey.com/pdf/Data%20Sheets/Knowles%20Acoustics%20PDFs/SiSonic_Design_Guide.pdf?src-supplier=Digi-Key; ComponentLink2Description: https://media.digikey.com/pdf/Data%20Sheets/Knowles%20Acoustics%20PDFs/SiSonic_Design_Guide.pdf?src-supplier=Digi-Key; Supplier Part Number 1: 423-1138-1-ND; LCSC Part Number: C73122
footprint SPU0410HR5H-PB
pins: 1 VDD, 2 GND, 3 GND, 4 OUTPUT

## YS-SBZ9032C03R16
designator LS?
Externally Driven 85dB@3V,10cm 3V 2700Hz SMD,D=9mm Buzzers ROHS; Manufacturer: Fengming; Manufacturer Part Number: YS-SBZ9032C03R16; Item Type: Buzzer; Package: SMD,D=9mm; LCSC Part Number: C409828; ComponentLink1Description: LCSC; ComponentLink1URL: https://www.lcsc.com/product-detail/Buzzers_Fengming-YS-SBZ9032C03R16_C409828.html
footprint YS-SBZ9032C03R16_ (NO 2700Hz 85dB @ 3V, 10cm 3V F9mm SMD,9x3.2mm Buzzers RoHS)
pins: 1, 2

## ZTS6117
designator MK?
1.5V~3.6V Omnidirectional 120uA -42dB 400Ω 59dB SMD-4P,1.9x2.8mm MEMS Microphones ROHS; Manufacturer: Zilltek; Manufacturer Part Number: ZTS6117; LCSC Part Number: C481300; Item Type: Microphone; ComponentLink1Description: LCSC; ComponentLink1URL: https://www.lcsc.com/product-detail/MEMS-Microphones_ZILLTEK-ZTS6117_C481300.html
footprint ZTS6117_
pins: 1 OUT, 2 GND, 3 GND, 4 VDD